# Altium footprint library CAP1000uF16VDC.PcbLib: 1 footprints
Each footprint in its own frame and in the unit in brackets; x right, y up, seen from the top. Pads: shape width x height; smd on the part's side, far side on the other; paste and mask are expansions set on the pad; w line width, h text height; cw(c..) or ccw(c..) is an arc to the next point about the centre after c.
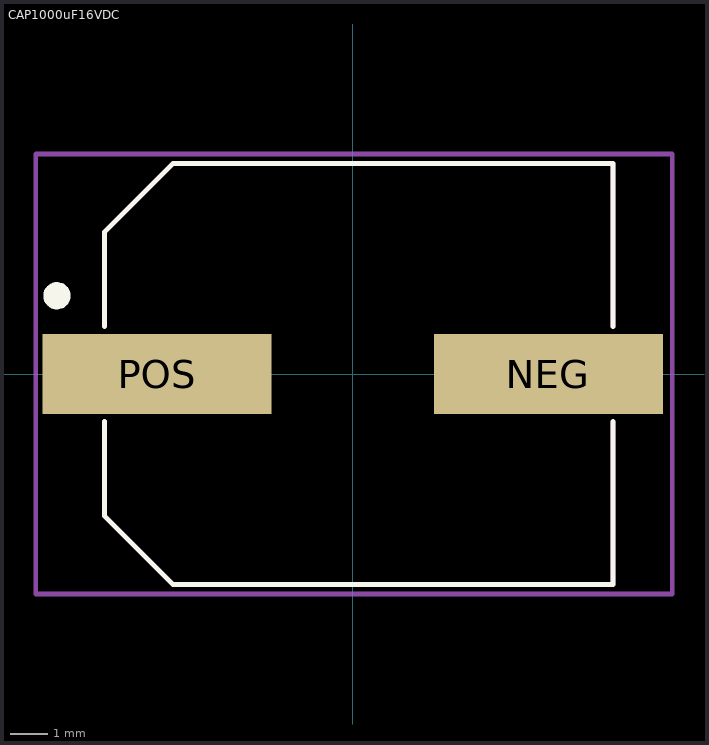
[diagram p0: the footprint, top view; thin cyan lines are the x and y axes]

## CAP1000uF16VDC [mm] "CAP1000uF16VDC"
pads (2):
  rect 6.15x2.15 smd: NEG(5.252,0) POS(-5.252,0)
Top Overlay:
  circle w0.254: c-7.938,2.095 r0.09
  circle w0.254: c-7.954,2.1 r0.142
  circle w0.127: c-7.942,2.1 r0.305
  lines w0.127: -6.667,-1.27 -6.667,-3.81 -4.826,-5.651 6.985,-5.651 6.985,-1.27 ; -6.667,1.27 -6.667,3.81 -4.826,5.651 6.985,5.651 6.985,1.27
Mechanical 13:
  lines w0.127: -6.667,-1.27 -6.667,-3.81 -4.826,-5.651 6.985,-5.651 6.985,-1.3 ; -6.667,1.3 -6.667,3.81 -4.826,5.651 -3,5.651 6.985,5.651 6.985,1.27
Mechanical 15:
  lines w0.127: -8.509,-5.905 8.572,-5.905 8.572,5.905 -8.509,5.905 -8.509,-5.905
3D body "CAP1000uF16VDC.stp": height 10.72, standoff 0, extent -5.855,-5.155 5.855,5.155